# Altium footprint library custom-case.PcbLib: 483 footprints (part 1 of 31)
Each footprint in its own frame and in the unit in brackets; x right, y up, seen from the top. Pads: shape width x height; smd on the part's side, far side on the other; paste and mask are expansions set on the pad; w line width, h text height; cw(c..) or ccw(c..) is an arc to the next point about the centre after c.
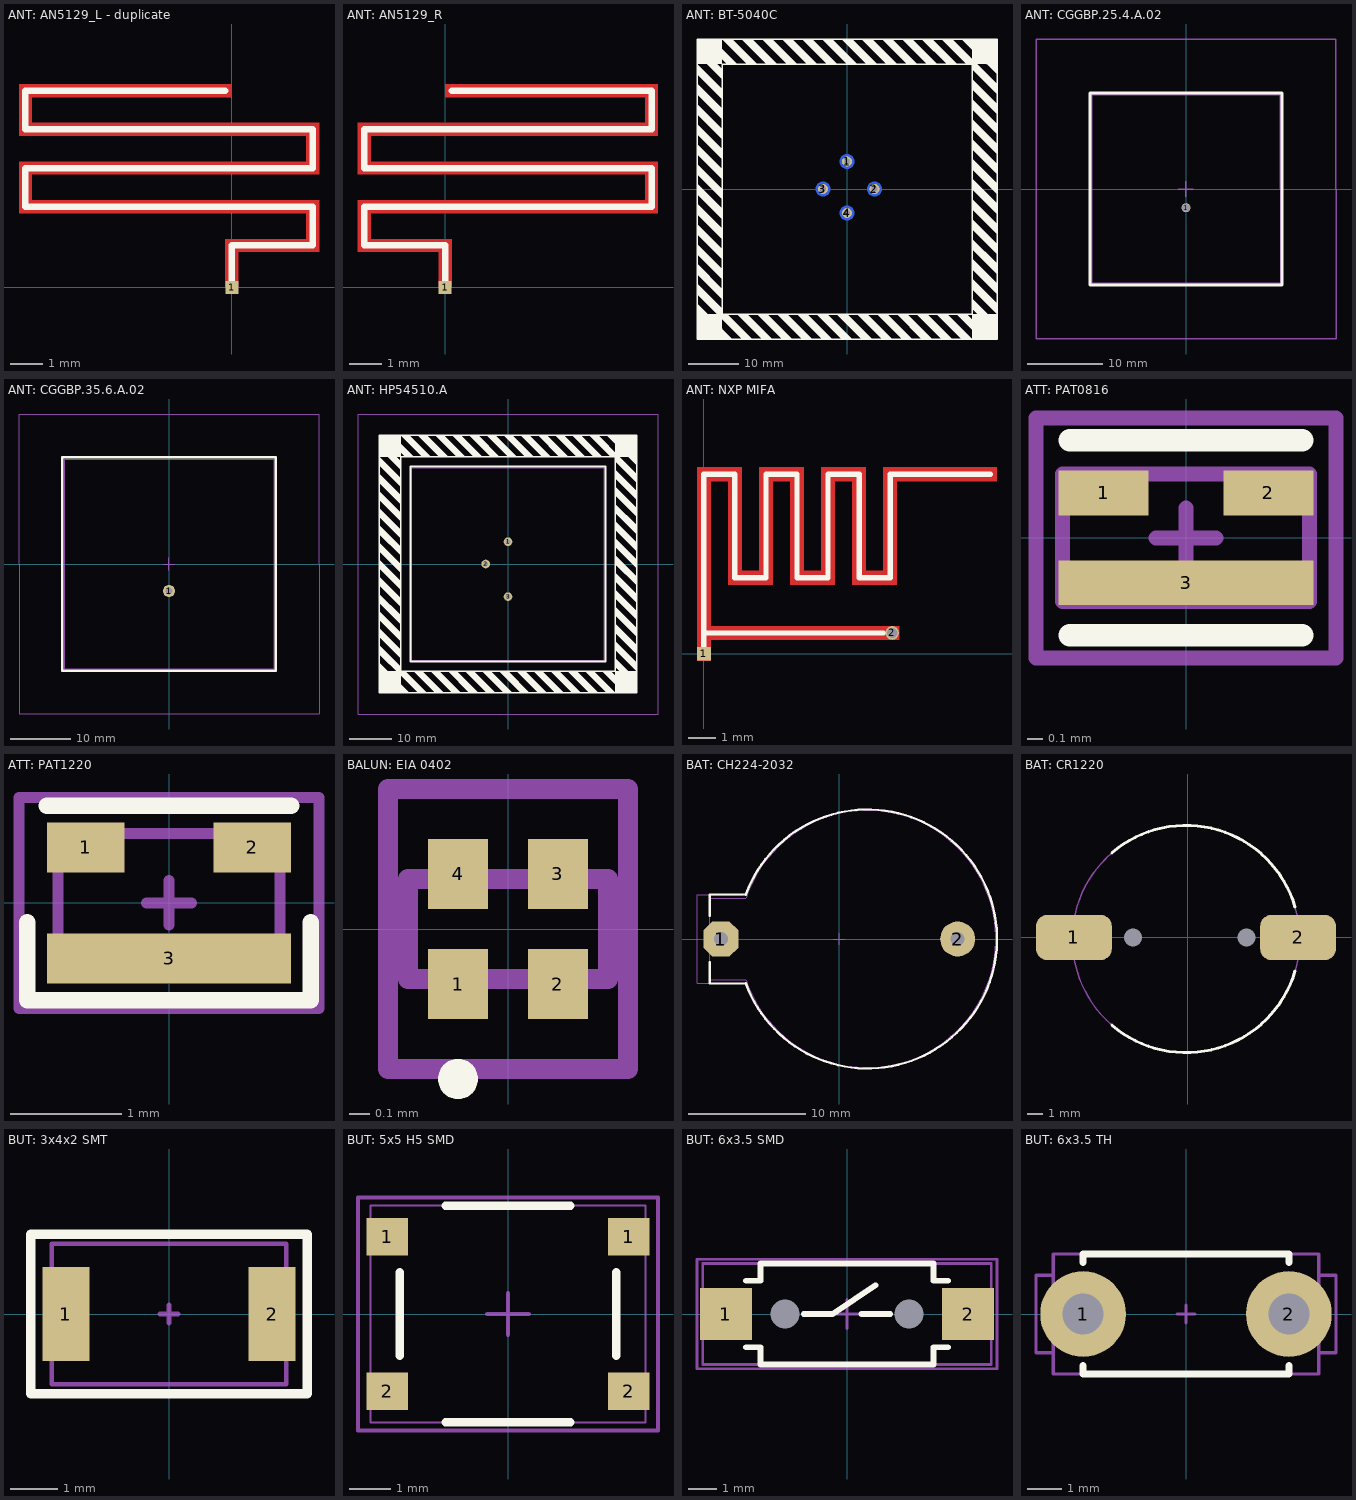
[diagram p0: the footprints below, top view; thin cyan lines are the x and y axes]

## ANT: AN5129_L - duplicate [mm] "2.4GHz antenna"
height 9
pads (1):
  rect 0.4x0.4 smd mask+0.102: 1(0,0)
Top Layer:
  region: -6.6,5.9 0,5.9 0,6.3 -6.6,6.3
  region: -6.2,4.7 -6.2,6.3 -6.6,6.3 -6.6,4.7
  region: -6.6,4.7 2.7,4.7 2.7,5.1 -6.6,5.1
  region: 2.7,3.5 2.7,5.1 2.3,5.1 2.3,3.5
  region: -6.6,3.5 2.7,3.5 2.7,3.9 -6.6,3.9
  region: -6.2,2.3 -6.2,3.9 -6.6,3.9 -6.6,2.3
  region: -6.6,2.3 2.7,2.3 2.7,2.7 -6.6,2.7
  region: 2.7,1.1 2.7,2.7 2.3,2.7 2.3,1.1
  region: 2.7,1.5 -0.2,1.5 -0.2,1.1 2.7,1.1
  region: 0.2,0 0.2,1.5 -0.2,1.5 -0.2,0
Top Overlay:
  lines w0.2: -0.2,6.1 -6.4,6.1 -6.4,4.9 2.5,4.9 2.5,3.7 -6.4,3.7 -6.4,2.5 2.5,2.5 2.5,1.3 0,1.3 0,0.2

## ANT: AN5129_R [mm] "2.4GHz antenna"
height 9
pads (1):
  rect 0.4x0.4 smd mask+0.102: 1(0,0)
Top Layer:
  region: 6.6,5.9 0,5.9 0,6.3 6.6,6.3
  region: 6.2,4.7 6.2,6.3 6.6,6.3 6.6,4.7
  region: 6.6,4.7 -2.7,4.7 -2.7,5.1 6.6,5.1
  region: -2.7,3.5 -2.7,5.1 -2.3,5.1 -2.3,3.5
  region: 6.6,3.5 -2.7,3.5 -2.7,3.9 6.6,3.9
  region: 6.2,2.3 6.2,3.9 6.6,3.9 6.6,2.3
  region: 6.6,2.3 -2.7,2.3 -2.7,2.7 6.6,2.7
  region: -2.7,1.1 -2.7,2.7 -2.3,2.7 -2.3,1.1
  region: -2.7,1.5 0.2,1.5 0.2,1.1 -2.7,1.1
  region: -0.2,0 -0.2,1.5 0.2,1.5 0.2,0
Top Overlay:
  lines w0.2: 0,0.2 0,1.3 -2.5,1.3 -2.5,2.5 6.4,2.5 6.4,3.7 -2.5,3.7 -2.5,4.9 6.4,4.9 6.4,6.1 0.2,6.1

## ANT: BT-5040C [mm] "Beitan GNSS antenna"
height 9
pads (8):
  round 3 smd far side: 1(0,5.5) 2(5.5,0) 3(-4.8,0) 4(0,-4.8)
  round 2 smd: 1(0,5.5) 2(5.5,0) 3(-4.8,0) 4(0,-4.8)
via 0,5.5 diameter 1.5 hole 1.2
via 5.5,0 diameter 1.5 hole 1.2
via -4.8,0 diameter 1.5 hole 1.2
via 0,-4.8 diameter 1.5 hole 1.2
Top Overlay:
  drawing of 68 lines, arcs and shapes, not listed
3D body "BT_4050_01.STEP": height 9.15, standoff -2.5, extent -25,-25 25,25

## ANT: CGGBP.25.4.A.02 [mm] "Taoglas L1 GNSS antenna"
height 9
pads (1):
  round 1.2 / inner round 1 / far side round 2.2 hole 1: 1(0,-2.5)
Top Overlay:
  lines w0.4: -12.8,-12.8 -12.8,12.8 12.8,12.8 12.8,-12.8 -12.8,-12.8
Top Assy:
  lines w0.2: -12.6,-12.6 -12.6,12.6 12.6,12.6 12.6,-12.6 -12.6,-12.6
Size Area:
  lines w0.2: -1,0 1,0 ; 0,-1 0,1 ; -20,-20 -20,20 20,20 20,-20 -20,-20
3D body "CGGBPD.25.A.STEP": height 5.5, standoff -1.95, extent -12.55,-12.55 12.55,12.55

## ANT: CGGBP.35.6.A.02 [mm] "Taoglas L1 GNSS antenna"
height 9
pads (1):
  round 2 hole 1.1: 1(0,-4.5)
Top Overlay:
  lines w0.4: -17.8,-17.8 17.8,-17.8 17.8,17.8 -17.8,17.8 -17.8,-17.8
Top Assy:
  lines w0.2: -17.5,-17.5 17.5,-17.5 17.5,17.5 -17.5,17.5 -17.5,-17.5
Size Area:
  lines w0.2: -1,0 1,0 ; 0,-1 0,1 ; -25,-25 25,-25 25,25 -25,25 -25,-25
3D body "CGGBP.35.6.A.02.STEP": height 7.25, standoff -1, extent -17.5,-17.5 20.5,17.5

## ANT: HP54510.A [mm] "Taoglas L1/5 GNSS antenna"
height 9
pads (3):
  round 2 hole 1.1: 1(0,5.2) 2(-5.2,0) 3(0,-7.6)
Top Overlay:
  drawing of 73 lines, arcs and shapes, not listed
Top Assy:
  lines w0.2: -22.5,-22.5 -22.5,22.5 22.5,22.5 22.5,-22.5 -22.5,-22.5
Size Area:
  lines w0.2: -35,-35 -35,0 -35,35 35,35 35,-35 -35,-35
3D body "HP54510A.STEP": height 10.51, standoff -3.1, extent -22.5,-22.5 22.5,22.5

## ANT: NXP MIFA [mil] "2.4GHz antenna"
height 354.33
pads (2):
  rect 20x20 smd mask+4: 1(0,0)
  round 19.68 hole 15 unplated mask+4: 2(273,30)
Top Layer:
  region: 145,250 80,250 80,270 145,270
  region: 235,250 170,250 170,270 235,270
  region: 55,270 55,100 35,100 35,270
  region: 100,270 100,100 80,100 80,270
  region: 125,100 125,270 145,270 145,100
  region: 170,100 170,270 190,270 190,100
  region: 215,100 215,270 235,270 235,100
  region: 260,100 260,270 280,270 280,100
  region: 100,100 35,100 35,120 100,120
  region: 190,100 125,100 125,120 190,120
  region: 55,250 -10,250 -10,270 55,270
  region: -10,-10 -10,270 10,270 10,-10
  region: 280,100 215,100 215,120 280,120
  region: 260,250 425,250 425,270 260,270
  region: -10,20 283,20 283,40 -10,40
Top Overlay:
  lines w7.87: 0,0 0,260 45,260 45,110 90,110 90,260 135,260 135,110 180,110 180,260 225,260 225,110 270,110 270,260 415,260 ; 0,30 260,30

## ATT: PAT0816 [mm] "Resistor attenuator"
height 9
pads (3):
  rect 0.6x0.3 smd: 1(-0.55,0.3) 2(0.55,0.3)
  rect 1.7x0.3 smd: 3(0,-0.3)
Top Overlay:
  lines w0.15: -0.775,-0.65 0.775,-0.65 ; -0.775,0.65 0.775,0.65
Top Assy:
  lines w0.1: -0.825,-0.425 -0.825,0.425 0.825,0.425 0.825,-0.425 -0.825,-0.425
Size Area:
  lines w0.1: -0.2,0 0.2,0 ; 0,-0.2 0,0.2 ; -1,-0.8 -1,0.8 1,0.8 1,-0.8 -1,-0.8
3D body "PAT0816.STEP": height 0.43, standoff 0, extent -0.81,-0.41 0.81,0.41

## ATT: PAT1220 [mm] "Resistor attenuator"
height 9
pads (3):
  rect 0.7x0.45 smd: 1(-0.75,0.5) 2(0.75,0.5)
  rect 2.2x0.45 smd: 3(0,-0.5)
Top Overlay:
  lines w0.15: -1.275,-0.175 -1.275,-0.875 1.275,-0.875 1.275,-0.175 ; -1.1,0.875 1.1,0.875
Top Assy:
  lines w0.1: -1,-0.625 1,-0.625 1,0.625 -1,0.625 -1,-0.625
Size Area:
  lines w0.1: -0.2,0 0.2,0 ; 0,-0.2 0,0.2 ; -1.35,-0.95 1.35,-0.95 1.35,0.95 -1.35,0.95 -1.35,-0.95
3D body "PAT1220.STEP": height 0.43, standoff 0.01, extent -1.01,-0.635 1.01,0.635

## BALUN: EIA 0402 [mm]
pads (4):
  rect 0.3x0.35 smd: 1(-0.25,-0.275) 2(0.25,-0.275) 3(0.25,0.275) 4(-0.25,0.275)
Top Overlay:
  lines w0.1: -0.25,-0.8 cw(c-0.25,-0.75) -0.25,-0.7 cw(c-0.25,-0.75) -0.25,-0.8
3D model:
  lines w0.1: -0.5,-0.25 0.5,-0.25 0.5,0.25 -0.5,0.25 -0.5,-0.25
Size Area:
  lines w0.1: -0.6,-0.7 0.6,-0.7 0.6,0.7 -0.6,0.7 -0.6,-0.7
3D body "HHM1908A2.stp": height 0.6, standoff 0, extent -0.5,-0.42 0.5,0.42

## BAT: CH224-2032 [mm] "ï¿½ï¿½ï¿½ï¿½ï¿½ï¿½ï¿½ï¿½ï¿½ï¿½ ï¿½ï¿½ï¿½ï¿½ï¿½ ï¿½ï¿½ï¿½ ï¿½ï¿½ï¿½ï¿½ï¿½ï¿½ï¿½ï¿½ 2032"
height 9
pads (2):
  oct 3x3 hole 1.2: 1(-10.151,0)
  round 3 hole 1.2: 2(10.152,0)
Top Overlay:
  lines w0.2: -11.1,-2 -11.1,-3.81 -8.01,-3.81 ; -11.1,2 -11.1,3.81 -8.025,3.81 ; -8.01,-3.794 ccw(c2.422,0) -8.007,3.803
Top Assy:
  lines w0.1: -7.992,-3.5 -11.1,-3.5 -11.1,3.5 -7.992,3.5 ; -7.989,-3.552 ccw(c2.422,0) -7.989,3.552
Size Area:
  lines w0.1: -8.255,-3.81 -12.192,-3.81 -12.192,3.81 -8.255,3.81 ; -8.01,3.794 cw(c2.422,0) -8.005,-3.808 ; -0.5,0 0.5,0 ; 0,-0.5 0,0.5
3D body "CH224-2032.step": height 8.5, standoff -4, extent -11.079,-11 13.421,11

## BAT: CR1220 [mm]
pads (4):
  rrect50% 5x3 smd mask+0.075: 1(-7.5,0) 2(7.3,0)
  round 0 hole 1.2 mask+0.075: MH(-3.6,0) MH(3.9,0)
Top Overlay:
  lines w0.2: -4.997,-5.781 ccw(c-0.1,-0.1) 7.1,-2.2 ; -4.997,5.581 cw(c-0.1,-0.1) 7.1,2
Top Assy:
  lines w0.1: -5.002,-5.776 cw(c-0.1,-0.1) -4.997,-5.781
3D body "User Library-CR1220-2.STEP": height 3.6, standoff 1.6, extent -6.175,-6.175 6.225,6.225
3D body "ALSRobot-CR1220.STEP": height 4.04, standoff -0.9, extent -9.35,-7.6 9.15,7.397

## BUT: 3x4x2 SMT [mm]
pads (2):
  rect 1x2 smd: 1(-2.2,0) 2(2.2,0)
Top Overlay:
  lines w0.2: -2.95,-1.7 -2.95,1.7 2.95,1.7 2.95,-1.7 -2.95,-1.7
Top Assy:
  lines w0.1: -2.5,-1.5 2.5,-1.5 2.5,1.5 -2.5,1.5 -2.5,-1.5
Size Area:
  lines w0.1: -0.2,0 0.2,0 ; 0,-0.2 0,0.2 ; -2.95,-1.7 2.95,-1.7 2.95,1.7 -2.95,1.7 -2.95,-1.7
3D body "User Library-Pushbutton3x4x2.step": height 2, standoff 0, extent -2.45,-1.45 2.45,1.45

## BUT: 5x5 H5 SMD [mm] "Leaded Tactile Button 5x5 height 5mm"
height 5
pads (4):
  rect 1x0.9 smd: 1(-2.9,1.85) 1(2.9,1.85) 2(-2.9,-1.85) 2(2.9,-1.85)
Top Overlay:
  lines w0.2: -2.6,-1 -2.6,1 ; -1.5,-2.6 1.5,-2.6 ; -1.5,2.6 1.5,2.6 ; 2.6,-1 2.6,1
Top Assy:
  lines w0.05: -3.3,-2.6 -3.3,2.6 3.3,2.6 3.3,-2.6 -3.3,-2.6
Size Area:
  lines w0.1: -0.5,0 0.5,0 ; 0,-0.5 0,0.5 ; -3.6,-2.8 3.6,-2.8 3.6,2.8 -3.6,2.8 -3.6,-2.8
3D body "Tactal Switch - SMD (5mmx 5mmx5.0mm).stp": height 5, standoff 0, extent -3.289,-2.55 3.289,2.55

## BUT: 6x3.5 SMD [mm]
pads (4):
  rect 1.8x1.8 smd mask+0.075: 1(-4.2,0) 2(4.2,0)
  round 0 hole 1 mask+0.075: ""(-2.15,0) ""(2.15,0)
Top Overlay:
  lines w0.2: -3.5,-1.15 -3,-1.15 -3,-1.75 3,-1.75 3,-1.15 3.5,-1.15 ; -3.5,1.15 -3,1.15 -3,1.75 3,1.75 3,1.15 3.5,1.15 ; -1.5,0 -0.5,0 1,1 ; 0.5,0 1.5,0
Top Assy:
  lines w0.1: -1.5,0 -0.5,0 1,1 ; 0.5,0 1.25,0 ; -5,-1.75 5,-1.75 5,1.75 -5,1.75 -5,-1.75
Size Area:
  lines w0.1: -0.5,0 0.5,0 ; 0,-0.5 0,0.5 ; -5.2,-1.9 5.2,-1.9 5.2,1.9 -5.2,1.9 -5.2,-1.9
3D body "User Library-DTSMF-32.STEP": height 5.05, standoff 0, extent -5,-1.75 5,1.75

## BUT: 6x3.5 TH [mm]
pads (2):
  round 2.5 hole 1.2 mask+0.075: 1(-3,0) 2(3,0)
Top Overlay:
  lines w0.2: -3,-1.5 -3,-1.75 3,-1.75 ; -3,1.5 -3,1.75 3,1.75 ; 3,-1.7 3,-1.5 ; 3,1.5 3,1.7
Top Assy:
  lines w0.1: -3.875,-1.75 3.875,-1.75 3.875,1.75 -3.875,1.75 -3.875,-1.75
Size Area:
  lines w0.1: -0.25,0 0.25,0 ; 0,-0.25 0,0.25 ; -4.375,-1.125 -4.375,1.125 -3.875,1.125 -3.875,1.75 3.875,1.75 3.875,1.125 4.375,1.125 4.375,-1.125 3.875,-1.125 3.875,-1.75 -3.875,-1.75 -3.875,-1.125 -4.375,-1.125
3D body "User Library-DTS-32.STEP": height 5.1, standoff -3.41, extent -3.878,-1.75 3.878,1.75